# Altium schematic symbol library SCH - FUSE - TPS26630RGET.SCHLIB: 1 symbol
Pins are listed as number, name and electrical type; pins without a type are passive.

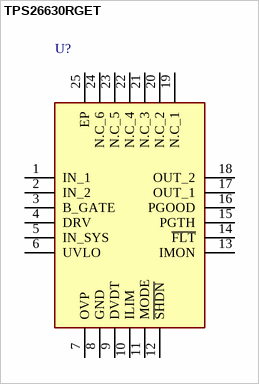
[diagram p0: symbol TPS26630RGET]

## TPS26630RGET
designator U?
pins: 1 IN_1, 2 IN_2, 3 B_GATE, 4 DRV, 5 IN_SYS, 6 UVLO, 7 OVP, 8 GND, 9 DVDT, 10 ILIM, 11 MODE, 12 ~{SHDN}, 13 IMON, 14 ~{FLT}, 15 PGTH, 16 PGOOD, 17 OUT_1, 18 OUT_2, 19 N.C_1, 20 N.C_2, 21 N.C_3, 22 N.C_4, 23 N.C_5, 24 N.C_6, 25 EP